# Altium footprint library Package_DFN_QFN.PcbLib: 735 footprints (part 26 of 46)
Each footprint in its own frame and in the unit in brackets; x right, y up, seen from the top. Pads: shape width x height; smd on the part's side, far side on the other; paste and mask are expansions set on the pad; w line width, h text height; cw(c..) or ccw(c..) is an arc to the next point about the centre after c.
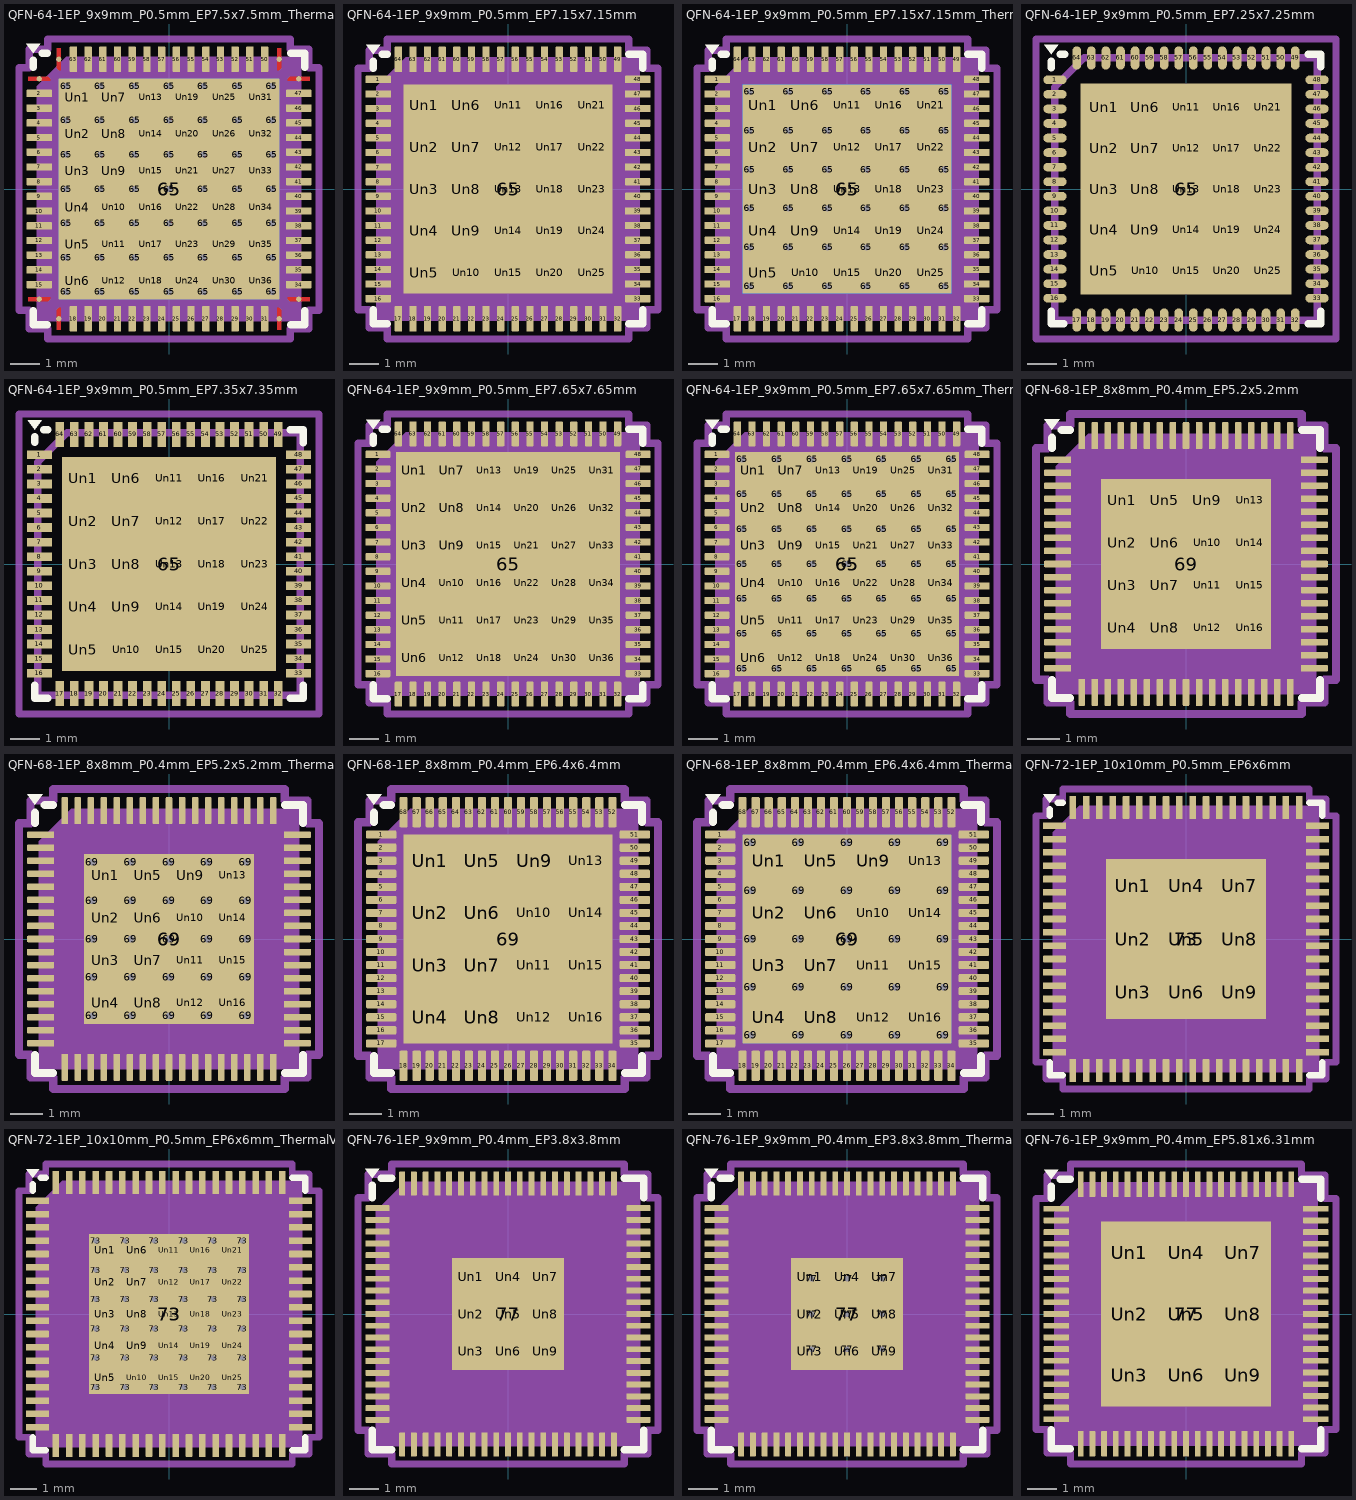
[diagram p25: the footprints below, top view; thin cyan lines are the x and y axes]

## QFN-64-1EP_9x9mm_P0.5mm_EP7.5x7.5mm_ThermalVias [mm] "QFN-64-1EP_9x9mm_P0.5mm_EP7.5x7.5mm_ThermalVias"
pads (151):
  round 0.179 smd: 1(-4.413,3.75) 16(-4.413,-3.75) 17(-3.75,-4.413) 32(3.75,-4.413) 33(4.413,-3.75) 48(4.413,3.75) 49(3.75,4.413) 64(-3.75,4.413)
  rrect25% 0.875x0.25 smd: 2(-4.413,3.25) 3(-4.413,2.75) 4(-4.413,2.25) 5(-4.413,1.75) 6(-4.413,1.25) 7(-4.413,0.75) 8(-4.413,0.25) 9(-4.413,-0.25) 10(-4.413,-0.75) 11(-4.413,-1.25) 12(-4.413,-1.75) 13(-4.413,-2.25) 14(-4.413,-2.75) 15(-4.413,-3.25) 34(4.413,-3.25) 35(4.413,-2.75) 36(4.413,-2.25) 37(4.413,-1.75) 38(4.413,-1.25) 39(4.413,-0.75) 40(4.413,-0.25) 41(4.413,0.25) 42(4.413,0.75) 43(4.413,1.25) 44(4.413,1.75) 45(4.413,2.25) 46(4.413,2.75) 47(4.413,3.25)
  rrect25% 0.25x0.875 smd: 18(-3.25,-4.413) 19(-2.75,-4.413) 20(-2.25,-4.413) 21(-1.75,-4.413) 22(-1.25,-4.413) 23(-0.75,-4.413) 24(-0.25,-4.413) 25(0.25,-4.413) 26(0.75,-4.413) 27(1.25,-4.413) 28(1.75,-4.413) 29(2.25,-4.413) 30(2.75,-4.413) 31(3.25,-4.413) 50(3.25,4.413) 51(2.75,4.413) 52(2.25,4.413) 53(1.75,4.413) 54(1.25,4.413) 55(0.75,4.413) 56(0.25,4.413) 57(-0.25,4.413) 58(-0.75,4.413) 59(-1.25,4.413) 60(-1.75,4.413) 61(-2.25,4.413) 62(-2.75,4.413) 63(-3.25,4.413)
  round 0.5 hole 0.2: 65(-3.5,-3.5) 65(-3.5,-2.333) 65(-3.5,-1.167) 65(-3.5,0) 65(-3.5,1.167) 65(-3.5,2.333) 65(-3.5,3.5) 65(-2.333,-3.5) 65(-2.333,-2.333) 65(-2.333,-1.167) 65(-2.333,0) 65(-2.333,1.167) 65(-2.333,2.333) 65(-2.333,3.5) 65(-1.167,-3.5) 65(-1.167,-2.333) 65(-1.167,-1.167) 65(-1.167,0) 65(-1.167,1.167) 65(-1.167,2.333) 65(-1.167,3.5) 65(0,-3.5) 65(0,-2.333) 65(0,-1.167) 65(0,0) 65(0,1.167) 65(0,2.333) 65(0,3.5) 65(1.167,-3.5) 65(1.167,-2.333) 65(1.167,-1.167) 65(1.167,0) 65(1.167,1.167) 65(1.167,2.333) 65(1.167,3.5) 65(2.333,-3.5) 65(2.333,-2.333) 65(2.333,-1.167) 65(2.333,0) 65(2.333,1.167) 65(2.333,2.333) 65(2.333,3.5) 65(3.5,-3.5) 65(3.5,-2.333) 65(3.5,-1.167) 65(3.5,0) 65(3.5,1.167) 65(3.5,2.333) 65(3.5,3.5)
  rect 7.5x7.5 smd: 65(0,0)
  rect 7.5x7.5 smd far side: 65(0,0)
  rrect25% 1.01x1.01 on Top Paste: Un1(-3.125,3.125) Un2(-3.125,1.875) Un3(-3.125,0.625) Un4(-3.125,-0.625) Un5(-3.125,-1.875) Un6(-3.125,-3.125) Un7(-1.875,3.125) Un8(-1.875,1.875) Un9(-1.875,0.625) Un10(-1.875,-0.625) Un11(-1.875,-1.875) Un12(-1.875,-3.125) Un13(-0.625,3.125) Un14(-0.625,1.875) Un15(-0.625,0.625) Un16(-0.625,-0.625) Un17(-0.625,-1.875) Un18(-0.625,-3.125) Un19(0.625,3.125) Un20(0.625,1.875) Un21(0.625,0.625) Un22(0.625,-0.625) Un23(0.625,-1.875) Un24(0.625,-3.125) Un25(1.875,3.125) Un26(1.875,1.875) Un27(1.875,0.625) Un28(1.875,-0.625) Un29(1.875,-1.875) Un30(1.875,-3.125) Un31(3.125,3.125) Un32(3.125,1.875) Un33(3.125,0.625) Un34(3.125,-0.625) Un35(3.125,-1.875) Un36(3.125,-3.125)
F.Cu:
  region: -4.038,3.749 -4.038,3.688 -4.788,3.688 -4.788,3.812 -4.101,3.812
  region: -4.038,-3.749 -4.101,-3.812 -4.788,-3.812 -4.788,-3.688 -4.038,-3.688
  region: -3.688,-4.788 -3.812,-4.788 -3.812,-4.101 -3.749,-4.038 -3.688,-4.038
  region: 3.812,-4.101 3.812,-4.788 3.688,-4.788 3.688,-4.038 3.749,-4.038
  region: 4.788,-3.812 4.101,-3.812 4.038,-3.749 4.038,-3.688 4.788,-3.688
  region: 4.788,3.688 4.038,3.688 4.038,3.749 4.101,3.812 4.788,3.812
  region: 3.812,4.101 3.749,4.038 3.688,4.038 3.688,4.788 3.812,4.788
  region: -3.688,4.038 -3.749,4.038 -3.812,4.101 -3.812,4.788 -3.688,4.788
F.SilkS:
  region: -4.61,4.61 -4.85,4.94 -4.37,4.94
  lines w0.254: -4.61,-4.135 -4.61,-4.61 -4.135,-4.61 ; -4.61,4.135 -4.61,4.37 ; -4.31,4.61 -4.135,4.61 ; 4.135,-4.61 4.61,-4.61 4.61,-4.135 ; 4.135,4.61 4.61,4.61 4.61,4.135
F.Paste:
  region: -4.038,3.749 -4.038,3.688 -4.788,3.688 -4.788,3.812 -4.101,3.812
  region: -4.038,-3.749 -4.101,-3.812 -4.788,-3.812 -4.788,-3.688 -4.038,-3.688
  region: -3.688,-4.788 -3.812,-4.788 -3.812,-4.101 -3.749,-4.038 -3.688,-4.038
  region: 3.812,-4.101 3.812,-4.788 3.688,-4.788 3.688,-4.038 3.749,-4.038
  region: 4.788,-3.812 4.101,-3.812 4.038,-3.749 4.038,-3.688 4.788,-3.688
  region: 4.788,3.688 4.038,3.688 4.038,3.749 4.101,3.812 4.788,3.812
  region: 3.812,4.101 3.749,4.038 3.688,4.038 3.688,4.788 3.812,4.788
  region: -3.688,4.038 -3.749,4.038 -3.812,4.101 -3.812,4.788 -3.688,4.788
F.Mask:
  region: -4.038,3.749 -4.038,3.688 -4.788,3.688 -4.788,3.812 -4.101,3.812
  region: -4.038,-3.749 -4.101,-3.812 -4.788,-3.812 -4.788,-3.688 -4.038,-3.688
  region: -3.688,-4.788 -3.812,-4.788 -3.812,-4.101 -3.749,-4.038 -3.688,-4.038
  region: 3.812,-4.101 3.812,-4.788 3.688,-4.788 3.688,-4.038 3.749,-4.038
  region: 4.788,-3.812 4.101,-3.812 4.038,-3.749 4.038,-3.688 4.788,-3.688
  region: 4.788,3.688 4.038,3.688 4.038,3.749 4.101,3.812 4.788,3.812
  region: 3.812,4.101 3.749,4.038 3.688,4.038 3.688,4.788 3.812,4.788
  region: -3.688,4.038 -3.749,4.038 -3.812,4.101 -3.812,4.788 -3.688,4.788
Top Component Center:
  lines w0.127: -0.127,0 0.127,0 -0.127,0 ; 0,-0.127 0,0.127 0,-0.127
Top Assembly:
  region: 4.5,-4.5 -4.5,-4.5 -4.5,3.5 -3.5,4.5 4.5,4.5
Top Courtyard:
  lines w0.254: -5.1,-4.13 -5.1,4.13 -4.75,4.13 -4.75,4.75 -4.13,4.75 -4.13,5.1 4.13,5.1 4.13,4.75 4.75,4.75 4.75,4.13 5.1,4.13 5.1,-4.13 4.75,-4.13 4.75,-4.75 4.13,-4.75 4.13,-5.1 -4.13,-5.1 -4.13,-4.75 -4.75,-4.75 -4.75,-4.13 -5.1,-4.13
Top Designator:
  text ".Designator" at -3.43,-0.344 h1.52
3D body "QFN-64-1EP_9x9mm_P0.5mm_EP7.35x7.35mm.step": height 0.75, standoff 0, extent -4.5,-4.5 4.5,4.5
3D body "QFN-64-1EP_9x9mm_P0.5mm_EP7.35x7.35mm.step": height 0.75, standoff 0, extent -4.5,-4.5 4.5,4.5
3D body "QFN-64-1EP_9x9mm_P0.5mm_EP7.35x7.35mm.step": height 0.75, standoff 0, extent -4.5,-4.5 4.5,4.5
3D body "QFN-64-1EP_9x9mm_P0.5mm_EP7.35x7.35mm.step": height 0.75, standoff 0, extent -4.5,-4.5 4.5,4.5

## QFN-64-1EP_9x9mm_P0.5mm_EP7.15x7.15mm [mm] "QFN-64-1EP_9x9mm_P0.5mm_EP7.15x7.15mm"
pads (90):
  rrect25% 0.875x0.25 smd: 1(-4.437,3.75) 2(-4.437,3.25) 3(-4.437,2.75) 4(-4.437,2.25) 5(-4.437,1.75) 6(-4.437,1.25) 7(-4.437,0.75) 8(-4.437,0.25) 9(-4.437,-0.25) 10(-4.437,-0.75) 11(-4.437,-1.25) 12(-4.437,-1.75) 13(-4.437,-2.25) 14(-4.437,-2.75) 15(-4.437,-3.25) 16(-4.437,-3.75) 33(4.437,-3.75) 34(4.437,-3.25) 35(4.437,-2.75) 36(4.437,-2.25) 37(4.437,-1.75) 38(4.437,-1.25) 39(4.437,-0.75) 40(4.437,-0.25) 41(4.437,0.25) 42(4.437,0.75) 43(4.437,1.25) 44(4.437,1.75) 45(4.437,2.25) 46(4.437,2.75) 47(4.437,3.25) 48(4.437,3.75)
  rrect25% 0.25x0.875 smd: 17(-3.75,-4.437) 18(-3.25,-4.437) 19(-2.75,-4.437) 20(-2.25,-4.437) 21(-1.75,-4.437) 22(-1.25,-4.437) 23(-0.75,-4.437) 24(-0.25,-4.437) 25(0.25,-4.437) 26(0.75,-4.437) 27(1.25,-4.437) 28(1.75,-4.437) 29(2.25,-4.437) 30(2.75,-4.437) 31(3.25,-4.437) 32(3.75,-4.437) 49(3.75,4.437) 50(3.25,4.437) 51(2.75,4.437) 52(2.25,4.437) 53(1.75,4.437) 54(1.25,4.437) 55(0.75,4.437) 56(0.25,4.437) 57(-0.25,4.437) 58(-0.75,4.437) 59(-1.25,4.437) 60(-1.75,4.437) 61(-2.25,4.437) 62(-2.75,4.437) 63(-3.25,4.437) 64(-3.75,4.437)
  rect 7.15x7.15 smd: 65(0,0)
  rrect22% 1.15x1.15 on Top Paste: Un1(-2.86,2.86) Un2(-2.86,1.43) Un3(-2.86,0) Un4(-2.86,-1.43) Un5(-2.86,-2.86) Un6(-1.43,2.86) Un7(-1.43,1.43) Un8(-1.43,0) Un9(-1.43,-1.43) Un10(-1.43,-2.86) Un11(0,2.86) Un12(0,1.43) Un13(0,0) Un14(0,-1.43) Un15(0,-2.86) Un16(1.43,2.86) Un17(1.43,1.43) Un18(1.43,0) Un19(1.43,-1.43) Un20(1.43,-2.86) Un21(2.86,2.86) Un22(2.86,1.43) Un23(2.86,0) Un24(2.86,-1.43) Un25(2.86,-2.86)
F.SilkS:
  region: -4.61,4.61 -4.85,4.94 -4.37,4.94
  lines w0.254: -4.61,-4.135 -4.61,-4.61 -4.135,-4.61 ; -4.61,4.135 -4.61,4.37 ; -4.31,4.61 -4.135,4.61 ; 4.135,-4.61 4.61,-4.61 4.61,-4.135 ; 4.135,4.61 4.61,4.61 4.61,4.135
Top Component Center:
  lines w0.127: -0.127,0 0.127,0 -0.127,0 ; 0,-0.127 0,0.127 0,-0.127
Top Assembly:
  region: 4.5,-4.5 -4.5,-4.5 -4.5,3.5 -3.5,4.5 4.5,4.5
Top Courtyard:
  lines w0.254: -5.13,-4.13 -4.75,-4.13 -4.75,-4.75 -4.13,-4.75 -4.13,-5.13 4.13,-5.13 4.13,-4.75 4.75,-4.75 4.75,-4.13 5.13,-4.13 5.13,4.13 4.75,4.13 4.75,4.75 4.13,4.75 4.13,5.13 -4.13,5.13 -4.13,4.75 -4.75,4.75 -4.75,4.13 -5.13,4.13 -5.13,-4.13
Top Designator:
  text ".Designator" at -3.43,-0.344 h1.52
3D body "QFN-64-1EP_9x9mm_P0.5mm_EP7.35x7.35mm.step": height 0.75, standoff 0, extent -4.5,-4.5 4.5,4.5

## QFN-64-1EP_9x9mm_P0.5mm_EP7.15x7.15mm_ThermalVias [mm] "QFN-64-1EP_9x9mm_P0.5mm_EP7.15x7.15mm_ThermalVias"
pads (127):
  rrect25% 0.875x0.25 smd: 1(-4.437,3.75) 2(-4.437,3.25) 3(-4.437,2.75) 4(-4.437,2.25) 5(-4.437,1.75) 6(-4.437,1.25) 7(-4.437,0.75) 8(-4.437,0.25) 9(-4.437,-0.25) 10(-4.437,-0.75) 11(-4.437,-1.25) 12(-4.437,-1.75) 13(-4.437,-2.25) 14(-4.437,-2.75) 15(-4.437,-3.25) 16(-4.437,-3.75) 33(4.437,-3.75) 34(4.437,-3.25) 35(4.437,-2.75) 36(4.437,-2.25) 37(4.437,-1.75) 38(4.437,-1.25) 39(4.437,-0.75) 40(4.437,-0.25) 41(4.437,0.25) 42(4.437,0.75) 43(4.437,1.25) 44(4.437,1.75) 45(4.437,2.25) 46(4.437,2.75) 47(4.437,3.25) 48(4.437,3.75)
  rrect25% 0.25x0.875 smd: 17(-3.75,-4.437) 18(-3.25,-4.437) 19(-2.75,-4.437) 20(-2.25,-4.437) 21(-1.75,-4.437) 22(-1.25,-4.437) 23(-0.75,-4.437) 24(-0.25,-4.437) 25(0.25,-4.437) 26(0.75,-4.437) 27(1.25,-4.437) 28(1.75,-4.437) 29(2.25,-4.437) 30(2.75,-4.437) 31(3.25,-4.437) 32(3.75,-4.437) 49(3.75,4.437) 50(3.25,4.437) 51(2.75,4.437) 52(2.25,4.437) 53(1.75,4.437) 54(1.25,4.437) 55(0.75,4.437) 56(0.25,4.437) 57(-0.25,4.437) 58(-0.75,4.437) 59(-1.25,4.437) 60(-1.75,4.437) 61(-2.25,4.437) 62(-2.75,4.437) 63(-3.25,4.437) 64(-3.75,4.437)
  round 0.5 hole 0.2: 65(-3.325,-3.325) 65(-3.325,-1.995) 65(-3.325,-0.665) 65(-3.325,0.665) 65(-3.325,1.995) 65(-3.325,3.325) 65(-1.995,-3.325) 65(-1.995,-1.995) 65(-1.995,-0.665) 65(-1.995,0.665) 65(-1.995,1.995) 65(-1.995,3.325) 65(-0.665,-3.325) 65(-0.665,-1.995) 65(-0.665,-0.665) 65(-0.665,0.665) 65(-0.665,1.995) 65(-0.665,3.325) 65(0.665,-3.325) 65(0.665,-1.995) 65(0.665,-0.665) 65(0.665,0.665) 65(0.665,1.995) 65(0.665,3.325) 65(1.995,-3.325) 65(1.995,-1.995) 65(1.995,-0.665) 65(1.995,0.665) 65(1.995,1.995) 65(1.995,3.325) 65(3.325,-3.325) 65(3.325,-1.995) 65(3.325,-0.665) 65(3.325,0.665) 65(3.325,1.995) 65(3.325,3.325)
  rect 7.15x7.15 smd: 65(0,0)
  rect 7.15x7.15 smd far side: 65(0,0)
  rrect22% 1.15x1.15 on Top Paste: Un1(-2.86,2.86) Un2(-2.86,1.43) Un3(-2.86,0) Un4(-2.86,-1.43) Un5(-2.86,-2.86) Un6(-1.43,2.86) Un7(-1.43,1.43) Un8(-1.43,0) Un9(-1.43,-1.43) Un10(-1.43,-2.86) Un11(0,2.86) Un12(0,1.43) Un13(0,0) Un14(0,-1.43) Un15(0,-2.86) Un16(1.43,2.86) Un17(1.43,1.43) Un18(1.43,0) Un19(1.43,-1.43) Un20(1.43,-2.86) Un21(2.86,2.86) Un22(2.86,1.43) Un23(2.86,0) Un24(2.86,-1.43) Un25(2.86,-2.86)
F.SilkS:
  region: -4.61,4.61 -4.85,4.94 -4.37,4.94
  lines w0.254: -4.61,-4.135 -4.61,-4.61 -4.135,-4.61 ; -4.61,4.135 -4.61,4.37 ; -4.31,4.61 -4.135,4.61 ; 4.135,-4.61 4.61,-4.61 4.61,-4.135 ; 4.135,4.61 4.61,4.61 4.61,4.135
Top Component Center:
  lines w0.127: -0.127,0 0.127,0 -0.127,0 ; 0,-0.127 0,0.127 0,-0.127
Top Assembly:
  region: 4.5,-4.5 -4.5,-4.5 -4.5,3.5 -3.5,4.5 4.5,4.5
Top Courtyard:
  lines w0.254: -5.13,-4.13 -5.13,4.13 -4.75,4.13 -4.75,4.75 -4.13,4.75 -4.13,5.13 4.13,5.13 4.13,4.75 4.75,4.75 4.75,4.13 5.13,4.13 5.13,-4.13 4.75,-4.13 4.75,-4.75 4.13,-4.75 4.13,-5.13 -4.13,-5.13 -4.13,-4.75 -4.75,-4.75 -4.75,-4.13 -5.13,-4.13
Top Designator:
  text ".Designator" at -3.43,-0.344 h1.52
3D body "QFN-64-1EP_9x9mm_P0.5mm_EP7.35x7.35mm.step": height 0.75, standoff 0, extent -4.5,-4.5 4.5,4.5

## QFN-64-1EP_9x9mm_P0.5mm_EP7.25x7.25mm [mm] "QFN-64-1EP_9x9mm_P0.5mm_EP7.25x7.25mm"
pads (90):
  rrect100% 0.8x0.3 smd: 1(-4.5,3.75) 2(-4.5,3.25) 3(-4.5,2.75) 4(-4.5,2.25) 5(-4.5,1.75) 6(-4.5,1.25) 7(-4.5,0.75) 8(-4.5,0.25) 9(-4.5,-0.25) 10(-4.5,-0.75) 11(-4.5,-1.25) 12(-4.5,-1.75) 13(-4.5,-2.25) 14(-4.5,-2.75) 15(-4.5,-3.25) 16(-4.5,-3.75) 33(4.5,-3.75) 34(4.5,-3.25) 35(4.5,-2.75) 36(4.5,-2.25) 37(4.5,-1.75) 38(4.5,-1.25) 39(4.5,-0.75) 40(4.5,-0.25) 41(4.5,0.25) 42(4.5,0.75) 43(4.5,1.25) 44(4.5,1.75) 45(4.5,2.25) 46(4.5,2.75) 47(4.5,3.25) 48(4.5,3.75)
  rrect100% 0.3x0.8 smd: 17(-3.75,-4.5) 18(-3.25,-4.5) 19(-2.75,-4.5) 20(-2.25,-4.5) 21(-1.75,-4.5) 22(-1.25,-4.5) 23(-0.75,-4.5) 24(-0.25,-4.5) 25(0.25,-4.5) 26(0.75,-4.5) 27(1.25,-4.5) 28(1.75,-4.5) 29(2.25,-4.5) 30(2.75,-4.5) 31(3.25,-4.5) 32(3.75,-4.5) 49(3.75,4.5) 50(3.25,4.5) 51(2.75,4.5) 52(2.25,4.5) 53(1.75,4.5) 54(1.25,4.5) 55(0.75,4.5) 56(0.25,4.5) 57(-0.25,4.5) 58(-0.75,4.5) 59(-1.25,4.5) 60(-1.75,4.5) 61(-2.25,4.5) 62(-2.75,4.5) 63(-3.25,4.5) 64(-3.75,4.5)
  rect 7.25x7.25 smd: 65(0,0)
  rect 1.19x1.19 on Top Paste: Un1(-2.8,2.8) Un2(-2.8,1.4) Un3(-2.8,0) Un4(-2.8,-1.4) Un5(-2.8,-2.8) Un6(-1.4,2.8) Un7(-1.4,1.4) Un8(-1.4,0) Un9(-1.4,-1.4) Un10(-1.4,-2.8) Un11(0,2.8) Un12(0,1.4) Un13(0,0) Un14(0,-1.4) Un15(0,-2.8) Un16(1.4,2.8) Un17(1.4,1.4) Un18(1.4,0) Un19(1.4,-1.4) Un20(1.4,-2.8) Un21(2.8,2.8) Un22(2.8,1.4) Un23(2.8,0) Un24(2.8,-1.4) Un25(2.8,-2.8)
F.SilkS:
  region: -4.62,4.62 -4.86,4.95 -4.38,4.95
  lines w0.254: -4.62,-4.2 -4.62,-4.62 -4.2,-4.62 ; -4.62,4.16 -4.62,4.38 ; -4.32,4.62 -4.16,4.62 ; 4.2,-4.62 4.62,-4.62 4.62,-4.2 ; 4.2,4.62 4.62,4.62 4.62,4.2
Top Component Center:
  lines w0.127: -0.127,0 0.127,0 -0.127,0 ; 0,-0.127 0,0.127 0,-0.127
Top Assembly:
  lines w0.254: -4.5,-4.5 -4.5,3.5 -3.5,4.5 4.5,4.5 4.5,-4.5 -4.5,-4.5
Top Courtyard:
  lines w0.254: -5.15,-5.15 -5.15,5.15 5.15,5.15 5.15,-5.15 -5.15,-5.15
Top Designator:
  text ".Designator" at -3.43,-0.344 h1.52
3D body "QFN-64-1EP_9x9mm_P0.5mm_EP7.35x7.35mm.step": height 0.75, standoff 0, extent -4.5,-4.5 4.5,4.5

## QFN-64-1EP_9x9mm_P0.5mm_EP7.35x7.35mm [mm] "QFN-64-1EP_9x9mm_P0.5mm_EP7.35x7.35mm"
pads (90):
  rect 0.85x0.3 smd: 1(-4.45,3.75) 2(-4.45,3.25) 3(-4.45,2.75) 4(-4.45,2.25) 5(-4.45,1.75) 6(-4.45,1.25) 7(-4.45,0.75) 8(-4.45,0.25) 9(-4.45,-0.25) 10(-4.45,-0.75) 11(-4.45,-1.25) 12(-4.45,-1.75) 13(-4.45,-2.25) 14(-4.45,-2.75) 15(-4.45,-3.25) 16(-4.45,-3.75) 33(4.45,-3.75) 34(4.45,-3.25) 35(4.45,-2.75) 36(4.45,-2.25) 37(4.45,-1.75) 38(4.45,-1.25) 39(4.45,-0.75) 40(4.45,-0.25) 41(4.45,0.25) 42(4.45,0.75) 43(4.45,1.25) 44(4.45,1.75) 45(4.45,2.25) 46(4.45,2.75) 47(4.45,3.25) 48(4.45,3.75)
  rect 0.3x0.85 smd: 17(-3.75,-4.45) 18(-3.25,-4.45) 19(-2.75,-4.45) 20(-2.25,-4.45) 21(-1.75,-4.45) 22(-1.25,-4.45) 23(-0.75,-4.45) 24(-0.25,-4.45) 25(0.25,-4.45) 26(0.75,-4.45) 27(1.25,-4.45) 28(1.75,-4.45) 29(2.25,-4.45) 30(2.75,-4.45) 31(3.25,-4.45) 32(3.75,-4.45) 49(3.75,4.45) 50(3.25,4.45) 51(2.75,4.45) 52(2.25,4.45) 53(1.75,4.45) 54(1.25,4.45) 55(0.75,4.45) 56(0.25,4.45) 57(-0.25,4.45) 58(-0.75,4.45) 59(-1.25,4.45) 60(-1.75,4.45) 61(-2.25,4.45) 62(-2.75,4.45) 63(-3.25,4.45) 64(-3.75,4.45)
  rect 7.35x7.35 smd: 65(0,0)
  rect 1.19x1.19 on Top Paste: Un1(-2.94,2.94) Un2(-2.94,1.47) Un3(-2.94,0) Un4(-2.94,-1.47) Un5(-2.94,-2.94) Un6(-1.47,2.94) Un7(-1.47,1.47) Un8(-1.47,0) Un9(-1.47,-1.47) Un10(-1.47,-2.94) Un11(0,2.94) Un12(0,1.47) Un13(0,0) Un14(0,-1.47) Un15(0,-2.94) Un16(1.47,2.94) Un17(1.47,1.47) Un18(1.47,0) Un19(1.47,-1.47) Un20(1.47,-2.94) Un21(2.94,2.94) Un22(2.94,1.47) Un23(2.94,0) Un24(2.94,-1.47) Un25(2.94,-2.94)
F.SilkS:
  region: -4.61,4.61 -4.85,4.94 -4.37,4.94
  lines w0.254: -4.61,4.17 -4.61,4.37 ; -4.607,-4.16 -4.607,-4.61 -4.16,-4.61 ; -4.31,4.61 -4.16,4.61 ; 4.16,-4.61 4.61,-4.61 4.61,-4.16 ; 4.16,4.61 4.61,4.61 4.61,4.16
Top Component Center:
  lines w0.127: -0.127,0 0.127,0 -0.127,0 ; 0,-0.127 0,0.127 0,-0.127
Top Assembly:
  lines w0.254: -4.5,-4.5 -4.5,3.5 -3.5,4.5 4.5,4.5 4.5,-4.5 -4.5,-4.5
Top Courtyard:
  lines w0.254: -5.15,-5.15 -5.15,5.15 5.15,5.15 5.15,-5.15 -5.15,-5.15
Top Designator:
  text ".Designator" at -3.43,-0.344 h1.52
3D body "QFN-64-1EP_9x9mm_P0.5mm_EP7.35x7.35mm.step": height 0.75, standoff 0, extent -4.5,-4.5 4.5,4.5

## QFN-64-1EP_9x9mm_P0.5mm_EP7.65x7.65mm [mm] "QFN-64-1EP_9x9mm_P0.5mm_EP7.65x7.65mm"
pads (101):
  rrect25% 0.85x0.25 smd: 1(-4.45,3.75) 2(-4.45,3.25) 3(-4.45,2.75) 4(-4.45,2.25) 5(-4.45,1.75) 6(-4.45,1.25) 7(-4.45,0.75) 8(-4.45,0.25) 9(-4.45,-0.25) 10(-4.45,-0.75) 11(-4.45,-1.25) 12(-4.45,-1.75) 13(-4.45,-2.25) 14(-4.45,-2.75) 15(-4.45,-3.25) 16(-4.45,-3.75) 33(4.45,-3.75) 34(4.45,-3.25) 35(4.45,-2.75) 36(4.45,-2.25) 37(4.45,-1.75) 38(4.45,-1.25) 39(4.45,-0.75) 40(4.45,-0.25) 41(4.45,0.25) 42(4.45,0.75) 43(4.45,1.25) 44(4.45,1.75) 45(4.45,2.25) 46(4.45,2.75) 47(4.45,3.25) 48(4.45,3.75)
  rrect25% 0.25x0.85 smd: 17(-3.75,-4.45) 18(-3.25,-4.45) 19(-2.75,-4.45) 20(-2.25,-4.45) 21(-1.75,-4.45) 22(-1.25,-4.45) 23(-0.75,-4.45) 24(-0.25,-4.45) 25(0.25,-4.45) 26(0.75,-4.45) 27(1.25,-4.45) 28(1.75,-4.45) 29(2.25,-4.45) 30(2.75,-4.45) 31(3.25,-4.45) 32(3.75,-4.45) 49(3.75,4.45) 50(3.25,4.45) 51(2.75,4.45) 52(2.25,4.45) 53(1.75,4.45) 54(1.25,4.45) 55(0.75,4.45) 56(0.25,4.45) 57(-0.25,4.45) 58(-0.75,4.45) 59(-1.25,4.45) 60(-1.75,4.45) 61(-2.25,4.45) 62(-2.75,4.45) 63(-3.25,4.45) 64(-3.75,4.45)
  rect 7.65x7.65 smd: 65(0,0)
  rrect24% 1.03x1.03 on Top Paste: Un1(-3.2,3.2) Un2(-3.2,1.92) Un3(-3.2,0.64) Un4(-3.2,-0.64) Un5(-3.2,-1.92) Un6(-3.2,-3.2) Un7(-1.92,3.2) Un8(-1.92,1.92) Un9(-1.92,0.64) Un10(-1.92,-0.64) Un11(-1.92,-1.92) Un12(-1.92,-3.2) Un13(-0.64,3.2) Un14(-0.64,1.92) Un15(-0.64,0.64) Un16(-0.64,-0.64) Un17(-0.64,-1.92) Un18(-0.64,-3.2) Un19(0.64,3.2) Un20(0.64,1.92) Un21(0.64,0.64) Un22(0.64,-0.64) Un23(0.64,-1.92) Un24(0.64,-3.2) Un25(1.92,3.2) Un26(1.92,1.92) Un27(1.92,0.64) Un28(1.92,-0.64) Un29(1.92,-1.92) Un30(1.92,-3.2) Un31(3.2,3.2) Un32(3.2,1.92) Un33(3.2,0.64) Un34(3.2,-0.64) Un35(3.2,-1.92) Un36(3.2,-3.2)
F.SilkS:
  region: -4.61,4.61 -4.85,4.94 -4.37,4.94
  lines w0.254: -4.61,-4.135 -4.61,-4.61 -4.135,-4.61 ; -4.61,4.135 -4.61,4.37 ; -4.31,4.61 -4.135,4.61 ; 4.135,-4.61 4.61,-4.61 4.61,-4.135 ; 4.135,4.61 4.61,4.61 4.61,4.135
Top Component Center:
  lines w0.127: -0.127,0 0.127,0 -0.127,0 ; 0,-0.127 0,0.127 0,-0.127
Top Assembly:
  region: 4.5,-4.5 -4.5,-4.5 -4.5,3.5 -3.5,4.5 4.5,4.5
Top Courtyard:
  lines w0.254: -5.13,-4.13 -4.75,-4.13 -4.75,-4.75 -4.13,-4.75 -4.13,-5.13 4.13,-5.13 4.13,-4.75 4.75,-4.75 4.75,-4.13 5.13,-4.13 5.13,4.13 4.75,4.13 4.75,4.75 4.13,4.75 4.13,5.13 -4.13,5.13 -4.13,4.75 -4.75,4.75 -4.75,4.13 -5.13,4.13 -5.13,-4.13
Top Designator:
  text ".Designator" at -3.43,-0.344 h1.52
3D body "QFN-64-1EP_9x9mm_P0.5mm_EP7.35x7.35mm.step": height 0.75, standoff 0, extent -4.5,-4.5 4.5,4.5

## QFN-64-1EP_9x9mm_P0.5mm_EP7.65x7.65mm_ThermalVias [mm] "QFN-64-1EP_9x9mm_P0.5mm_EP7.65x7.65mm_ThermalVias"
pads (151):
  rrect25% 0.85x0.25 smd: 1(-4.45,3.75) 2(-4.45,3.25) 3(-4.45,2.75) 4(-4.45,2.25) 5(-4.45,1.75) 6(-4.45,1.25) 7(-4.45,0.75) 8(-4.45,0.25) 9(-4.45,-0.25) 10(-4.45,-0.75) 11(-4.45,-1.25) 12(-4.45,-1.75) 13(-4.45,-2.25) 14(-4.45,-2.75) 15(-4.45,-3.25) 16(-4.45,-3.75) 33(4.45,-3.75) 34(4.45,-3.25) 35(4.45,-2.75) 36(4.45,-2.25) 37(4.45,-1.75) 38(4.45,-1.25) 39(4.45,-0.75) 40(4.45,-0.25) 41(4.45,0.25) 42(4.45,0.75) 43(4.45,1.25) 44(4.45,1.75) 45(4.45,2.25) 46(4.45,2.75) 47(4.45,3.25) 48(4.45,3.75)
  rrect25% 0.25x0.85 smd: 17(-3.75,-4.45) 18(-3.25,-4.45) 19(-2.75,-4.45) 20(-2.25,-4.45) 21(-1.75,-4.45) 22(-1.25,-4.45) 23(-0.75,-4.45) 24(-0.25,-4.45) 25(0.25,-4.45) 26(0.75,-4.45) 27(1.25,-4.45) 28(1.75,-4.45) 29(2.25,-4.45) 30(2.75,-4.45) 31(3.25,-4.45) 32(3.75,-4.45) 49(3.75,4.45) 50(3.25,4.45) 51(2.75,4.45) 52(2.25,4.45) 53(1.75,4.45) 54(1.25,4.45) 55(0.75,4.45) 56(0.25,4.45) 57(-0.25,4.45) 58(-0.75,4.45) 59(-1.25,4.45) 60(-1.75,4.45) 61(-2.25,4.45) 62(-2.75,4.45) 63(-3.25,4.45) 64(-3.75,4.45)
  round 0.5 hole 0.2: 65(-3.575,-3.575) 65(-3.575,-2.383) 65(-3.575,-1.192) 65(-3.575,0) 65(-3.575,1.192) 65(-3.575,2.383) 65(-3.575,3.575) 65(-2.383,-3.575) 65(-2.383,-2.383) 65(-2.383,-1.192) 65(-2.383,0) 65(-2.383,1.192) 65(-2.383,2.383) 65(-2.383,3.575) 65(-1.192,-3.575) 65(-1.192,-2.383) 65(-1.192,-1.192) 65(-1.192,0) 65(-1.192,1.192) 65(-1.192,2.383) 65(-1.192,3.575) 65(0,-3.575) 65(0,-2.383) 65(0,-1.192) 65(0,0) 65(0,1.192) 65(0,2.383) 65(0,3.575) 65(1.192,-3.575) 65(1.192,-2.383) 65(1.192,-1.192) 65(1.192,0) 65(1.192,1.192) 65(1.192,2.383) 65(1.192,3.575) 65(2.383,-3.575) 65(2.383,-2.383) 65(2.383,-1.192) 65(2.383,0) 65(2.383,1.192) 65(2.383,2.383) 65(2.383,3.575) 65(3.575,-3.575) 65(3.575,-2.383) 65(3.575,-1.192) 65(3.575,0) 65(3.575,1.192) 65(3.575,2.383) 65(3.575,3.575)
  rect 7.65x7.65 smd: 65(0,0)
  rect 7.65x7.65 smd far side: 65(0,0)
  rrect24% 1.03x1.03 on Top Paste: Un1(-3.2,3.2) Un2(-3.2,1.92) Un3(-3.2,0.64) Un4(-3.2,-0.64) Un5(-3.2,-1.92) Un6(-3.2,-3.2) Un7(-1.92,3.2) Un8(-1.92,1.92) Un9(-1.92,0.64) Un10(-1.92,-0.64) Un11(-1.92,-1.92) Un12(-1.92,-3.2) Un13(-0.64,3.2) Un14(-0.64,1.92) Un15(-0.64,0.64) Un16(-0.64,-0.64) Un17(-0.64,-1.92) Un18(-0.64,-3.2) Un19(0.64,3.2) Un20(0.64,1.92) Un21(0.64,0.64) Un22(0.64,-0.64) Un23(0.64,-1.92) Un24(0.64,-3.2) Un25(1.92,3.2) Un26(1.92,1.92) Un27(1.92,0.64) Un28(1.92,-0.64) Un29(1.92,-1.92) Un30(1.92,-3.2) Un31(3.2,3.2) Un32(3.2,1.92) Un33(3.2,0.64) Un34(3.2,-0.64) Un35(3.2,-1.92) Un36(3.2,-3.2)
F.SilkS:
  region: -4.61,4.61 -4.85,4.94 -4.37,4.94
  lines w0.254: -4.61,-4.135 -4.61,-4.61 -4.135,-4.61 ; -4.61,4.135 -4.61,4.37 ; -4.31,4.61 -4.135,4.61 ; 4.135,-4.61 4.61,-4.61 4.61,-4.135 ; 4.135,4.61 4.61,4.61 4.61,4.135
Top Component Center:
  lines w0.127: -0.127,0 0.127,0 -0.127,0 ; 0,-0.127 0,0.127 0,-0.127
Top Assembly:
  region: 4.5,-4.5 -4.5,-4.5 -4.5,3.5 -3.5,4.5 4.5,4.5
Top Courtyard:
  lines w0.254: -5.13,-4.13 -4.75,-4.13 -4.75,-4.75 -4.13,-4.75 -4.13,-5.13 4.13,-5.13 4.13,-4.75 4.75,-4.75 4.75,-4.13 5.13,-4.13 5.13,4.13 4.75,4.13 4.75,4.75 4.13,4.75 4.13,5.13 -4.13,5.13 -4.13,4.75 -4.75,4.75 -4.75,4.13 -5.13,4.13 -5.13,-4.13
Top Designator:
  text ".Designator" at -3.43,-0.344 h1.52
3D body "QFN-64-1EP_9x9mm_P0.5mm_EP7.35x7.35mm.step": height 0.75, standoff 0, extent -4.5,-4.5 4.5,4.5

## QFN-68-1EP_8x8mm_P0.4mm_EP5.2x5.2mm [mm] "QFN-68-1EP_8x8mm_P0.4mm_EP5.2x5.2mm"
pads (85):
  rrect25% 0.825x0.2 smd: 1(-3.938,3.2) 2(-3.938,2.8) 3(-3.938,2.4) 4(-3.938,2) 5(-3.938,1.6) 6(-3.938,1.2) 7(-3.938,0.8) 8(-3.938,0.4) 9(-3.938,0) 10(-3.938,-0.4) 11(-3.938,-0.8) 12(-3.938,-1.2) 13(-3.938,-1.6) 14(-3.938,-2) 15(-3.938,-2.4) 16(-3.938,-2.8) 17(-3.938,-3.2) 35(3.938,-3.2) 36(3.938,-2.8) 37(3.938,-2.4) 38(3.938,-2) 39(3.938,-1.6) 40(3.938,-1.2) 41(3.938,-0.8) 42(3.938,-0.4) 43(3.938,0) 44(3.938,0.4) 45(3.938,0.8) 46(3.938,1.2) 47(3.938,1.6) 48(3.938,2) 49(3.938,2.4) 50(3.938,2.8) 51(3.938,3.2)
  rrect25% 0.2x0.825 smd: 18(-3.2,-3.938) 19(-2.8,-3.938) 20(-2.4,-3.938) 21(-2,-3.938) 22(-1.6,-3.938) 23(-1.2,-3.938) 24(-0.8,-3.938) 25(-0.4,-3.938) 26(0,-3.938) 27(0.4,-3.938) 28(0.8,-3.938) 29(1.2,-3.938) 30(1.6,-3.938) 31(2,-3.938) 32(2.4,-3.938) 33(2.8,-3.938) 34(3.2,-3.938) 52(3.2,3.938) 53(2.8,3.938) 54(2.4,3.938) 55(2,3.938) 56(1.6,3.938) 57(1.2,3.938) 58(0.8,3.938) 59(0.4,3.938) 60(0,3.938) 61(-0.4,3.938) 62(-0.8,3.938) 63(-1.2,3.938) 64(-1.6,3.938) 65(-2,3.938) 66(-2.4,3.938) 67(-2.8,3.938) 68(-3.2,3.938)
  rect 5.2x5.2 smd: 69(0,0)
  rrect24% 1.05x1.05 on Top Paste: Un1(-1.95,1.95) Un2(-1.95,0.65) Un3(-1.95,-0.65) Un4(-1.95,-1.95) Un5(-0.65,1.95) Un6(-0.65,0.65) Un7(-0.65,-0.65) Un8(-0.65,-1.95) Un9(0.65,1.95) Un10(0.65,0.65) Un11(0.65,-0.65) Un12(0.65,-1.95) Un13(1.95,1.95) Un14(1.95,0.65) Un15(1.95,-0.65) Un16(1.95,-1.95)
F.SilkS:
  region: -4.11,4.11 -4.35,4.44 -3.87,4.44
  lines w0.254: -4.11,-3.56 -4.11,-4.11 -3.56,-4.11 ; -4.11,3.56 -4.11,3.87 ; -3.81,4.11 -3.56,4.11 ; 3.56,-4.11 4.11,-4.11 4.11,-3.56 ; 3.56,4.11 4.11,4.11 4.11,3.56
Top Component Center:
  lines w0.127: -0.127,0 0.127,0 -0.127,0 ; 0,-0.127 0,0.127 0,-0.127
Top Assembly:
  region: 4,-4 -4,-4 -4,3 -3,4 4,4
Top Courtyard:
  lines w0.254: -4.6,-3.55 -4.6,3.55 -4.25,3.55 -4.25,4.25 -3.55,4.25 -3.55,4.6 3.55,4.6 3.55,4.25 4.25,4.25 4.25,3.55 4.6,3.55 4.6,-3.55 4.25,-3.55 4.25,-4.25 3.55,-4.25 3.55,-4.6 -3.55,-4.6 -3.55,-4.25 -4.25,-4.25 -4.25,-3.55 -4.6,-3.55
Top Designator:
  text ".Designator" at -3.43,-0.344 h1.52
3D body "QFN-68-1EP_8x8mm_P0.4mm_EP5.2x5.2mm.step": height 0.87, standoff 0, extent -4,-4 4,4

## QFN-68-1EP_8x8mm_P0.4mm_EP5.2x5.2mm_ThermalVias [mm] "QFN-68-1EP_8x8mm_P0.4mm_EP5.2x5.2mm_ThermalVias"
pads (111):
  rrect25% 0.825x0.2 smd: 1(-3.938,3.2) 2(-3.938,2.8) 3(-3.938,2.4) 4(-3.938,2) 5(-3.938,1.6) 6(-3.938,1.2) 7(-3.938,0.8) 8(-3.938,0.4) 9(-3.938,0) 10(-3.938,-0.4) 11(-3.938,-0.8) 12(-3.938,-1.2) 13(-3.938,-1.6) 14(-3.938,-2) 15(-3.938,-2.4) 16(-3.938,-2.8) 17(-3.938,-3.2) 35(3.938,-3.2) 36(3.938,-2.8) 37(3.938,-2.4) 38(3.938,-2) 39(3.938,-1.6) 40(3.938,-1.2) 41(3.938,-0.8) 42(3.938,-0.4) 43(3.938,0) 44(3.938,0.4) 45(3.938,0.8) 46(3.938,1.2) 47(3.938,1.6) 48(3.938,2) 49(3.938,2.4) 50(3.938,2.8) 51(3.938,3.2)
  rrect25% 0.2x0.825 smd: 18(-3.2,-3.938) 19(-2.8,-3.938) 20(-2.4,-3.938) 21(-2,-3.938) 22(-1.6,-3.938) 23(-1.2,-3.938) 24(-0.8,-3.938) 25(-0.4,-3.938) 26(0,-3.938) 27(0.4,-3.938) 28(0.8,-3.938) 29(1.2,-3.938) 30(1.6,-3.938) 31(2,-3.938) 32(2.4,-3.938) 33(2.8,-3.938) 34(3.2,-3.938) 52(3.2,3.938) 53(2.8,3.938) 54(2.4,3.938) 55(2,3.938) 56(1.6,3.938) 57(1.2,3.938) 58(0.8,3.938) 59(0.4,3.938) 60(0,3.938) 61(-0.4,3.938) 62(-0.8,3.938) 63(-1.2,3.938) 64(-1.6,3.938) 65(-2,3.938) 66(-2.4,3.938) 67(-2.8,3.938) 68(-3.2,3.938)
  round 0.5 hole 0.2: 69(-2.35,-2.35) 69(-2.35,-1.175) 69(-2.35,0) 69(-2.35,1.175) 69(-2.35,2.35) 69(-1.175,-2.35) 69(-1.175,-1.175) 69(-1.175,0) 69(-1.175,1.175) 69(-1.175,2.35) 69(0,-2.35) 69(0,-1.175) 69(0,0) 69(0,1.175) 69(0,2.35) 69(1.175,-2.35) 69(1.175,-1.175) 69(1.175,0) 69(1.175,1.175) 69(1.175,2.35) 69(2.35,-2.35) 69(2.35,-1.175) 69(2.35,0) 69(2.35,1.175) 69(2.35,2.35)
  rect 5.2x5.2 smd: 69(0,0)
  rect 5.2x5.2 smd far side: 69(0,0)
  rrect25% 1.01x1.01 on Top Paste: Un1(-1.95,1.95) Un2(-1.95,0.65) Un3(-1.95,-0.65) Un4(-1.95,-1.95) Un5(-0.65,1.95) Un6(-0.65,0.65) Un7(-0.65,-0.65) Un8(-0.65,-1.95) Un9(0.65,1.95) Un10(0.65,0.65) Un11(0.65,-0.65) Un12(0.65,-1.95) Un13(1.95,1.95) Un14(1.95,0.65) Un15(1.95,-0.65) Un16(1.95,-1.95)
F.SilkS:
  region: -4.11,4.11 -4.35,4.44 -3.87,4.44
  lines w0.254: -4.11,-3.56 -4.11,-4.11 -3.56,-4.11 ; -4.11,3.56 -4.11,3.87 ; -3.81,4.11 -3.56,4.11 ; 3.56,-4.11 4.11,-4.11 4.11,-3.56 ; 3.56,4.11 4.11,4.11 4.11,3.56
Top Component Center:
  lines w0.127: -0.127,0 0.127,0 -0.127,0 ; 0,-0.127 0,0.127 0,-0.127
Top Assembly:
  region: 4,-4 -4,-4 -4,3 -3,4 4,4
Top Courtyard:
  lines w0.254: -4.6,-3.55 -4.6,3.55 -4.25,3.55 -4.25,4.25 -3.55,4.25 -3.55,4.6 3.55,4.6 3.55,4.25 4.25,4.25 4.25,3.55 4.6,3.55 4.6,-3.55 4.25,-3.55 4.25,-4.25 3.55,-4.25 3.55,-4.6 -3.55,-4.6 -3.55,-4.25 -4.25,-4.25 -4.25,-3.55 -4.6,-3.55
Top Designator:
  text ".Designator" at -3.43,-0.344 h1.52
3D body "QFN-68-1EP_8x8mm_P0.4mm_EP5.2x5.2mm.step": height 0.87, standoff 0, extent -4,-4 4,4

## QFN-68-1EP_8x8mm_P0.4mm_EP6.4x6.4mm [mm] "QFN-68-1EP_8x8mm_P0.4mm_EP6.4x6.4mm"
pads (85):
  rrect25% 0.925x0.25 smd: 1(-3.888,3.2) 2(-3.888,2.8) 3(-3.888,2.4) 4(-3.888,2) 5(-3.888,1.6) 6(-3.888,1.2) 7(-3.888,0.8) 8(-3.888,0.4) 9(-3.888,0) 10(-3.888,-0.4) 11(-3.888,-0.8) 12(-3.888,-1.2) 13(-3.888,-1.6) 14(-3.888,-2) 15(-3.888,-2.4) 16(-3.888,-2.8) 17(-3.888,-3.2) 35(3.888,-3.2) 36(3.888,-2.8) 37(3.888,-2.4) 38(3.888,-2) 39(3.888,-1.6) 40(3.888,-1.2) 41(3.888,-0.8) 42(3.888,-0.4) 43(3.888,0) 44(3.888,0.4) 45(3.888,0.8) 46(3.888,1.2) 47(3.888,1.6) 48(3.888,2) 49(3.888,2.4) 50(3.888,2.8) 51(3.888,3.2)
  rrect25% 0.25x0.925 smd: 18(-3.2,-3.888) 19(-2.8,-3.888) 20(-2.4,-3.888) 21(-2,-3.888) 22(-1.6,-3.888) 23(-1.2,-3.888) 24(-0.8,-3.888) 25(-0.4,-3.888) 26(0,-3.888) 27(0.4,-3.888) 28(0.8,-3.888) 29(1.2,-3.888) 30(1.6,-3.888) 31(2,-3.888) 32(2.4,-3.888) 33(2.8,-3.888) 34(3.2,-3.888) 52(3.2,3.888) 53(2.8,3.888) 54(2.4,3.888) 55(2,3.888) 56(1.6,3.888) 57(1.2,3.888) 58(0.8,3.888) 59(0.4,3.888) 60(0,3.888) 61(-0.4,3.888) 62(-0.8,3.888) 63(-1.2,3.888) 64(-1.6,3.888) 65(-2,3.888) 66(-2.4,3.888) 67(-2.8,3.888) 68(-3.2,3.888)
  rect 6.4x6.4 smd: 69(0,0)
  rrect19% 1.29x1.29 on Top Paste: Un1(-2.4,2.4) Un2(-2.4,0.8) Un3(-2.4,-0.8) Un4(-2.4,-2.4) Un5(-0.8,2.4) Un6(-0.8,0.8) Un7(-0.8,-0.8) Un8(-0.8,-2.4) Un9(0.8,2.4) Un10(0.8,0.8) Un11(0.8,-0.8) Un12(0.8,-2.4) Un13(2.4,2.4) Un14(2.4,0.8) Un15(2.4,-0.8) Un16(2.4,-2.4)
F.SilkS:
  region: -4.11,4.11 -4.35,4.44 -3.87,4.44
  lines w0.254: -4.11,-3.585 -4.11,-4.11 -3.585,-4.11 ; -4.11,3.585 -4.11,3.87 ; -3.81,4.11 -3.585,4.11 ; 3.585,-4.11 4.11,-4.11 4.11,-3.585 ; 3.585,4.11 4.11,4.11 4.11,3.585
Top Component Center:
  lines w0.127: -0.127,0 0.127,0 -0.127,0 ; 0,-0.127 0,0.127 0,-0.127
Top Assembly:
  region: 4,-4 -4,-4 -4,3 -3,4 4,4
Top Courtyard:
  lines w0.254: -4.6,-3.58 -4.25,-3.58 -4.25,-4.25 -3.58,-4.25 -3.58,-4.6 3.58,-4.6 3.58,-4.25 4.25,-4.25 4.25,-3.58 4.6,-3.58 4.6,3.58 4.25,3.58 4.25,4.25 3.58,4.25 3.58,4.6 -3.58,4.6 -3.58,4.25 -4.25,4.25 -4.25,3.58 -4.6,3.58 -4.6,-3.58
Top Designator:
  text ".Designator" at -3.43,-0.344 h1.52
3D body "QFN-68-1EP_8x8mm_P0.4mm_EP5.2x5.2mm.step": height 0.87, standoff 0, extent -4,-4 4,4

## QFN-68-1EP_8x8mm_P0.4mm_EP6.4x6.4mm_ThermalVias [mm] "QFN-68-1EP_8x8mm_P0.4mm_EP6.4x6.4mm_ThermalVias"
pads (111):
  rrect25% 0.925x0.25 smd: 1(-3.888,3.2) 2(-3.888,2.8) 3(-3.888,2.4) 4(-3.888,2) 5(-3.888,1.6) 6(-3.888,1.2) 7(-3.888,0.8) 8(-3.888,0.4) 9(-3.888,0) 10(-3.888,-0.4) 11(-3.888,-0.8) 12(-3.888,-1.2) 13(-3.888,-1.6) 14(-3.888,-2) 15(-3.888,-2.4) 16(-3.888,-2.8) 17(-3.888,-3.2) 35(3.888,-3.2) 36(3.888,-2.8) 37(3.888,-2.4) 38(3.888,-2) 39(3.888,-1.6) 40(3.888,-1.2) 41(3.888,-0.8) 42(3.888,-0.4) 43(3.888,0) 44(3.888,0.4) 45(3.888,0.8) 46(3.888,1.2) 47(3.888,1.6) 48(3.888,2) 49(3.888,2.4) 50(3.888,2.8) 51(3.888,3.2)
  rrect25% 0.25x0.925 smd: 18(-3.2,-3.888) 19(-2.8,-3.888) 20(-2.4,-3.888) 21(-2,-3.888) 22(-1.6,-3.888) 23(-1.2,-3.888) 24(-0.8,-3.888) 25(-0.4,-3.888) 26(0,-3.888) 27(0.4,-3.888) 28(0.8,-3.888) 29(1.2,-3.888) 30(1.6,-3.888) 31(2,-3.888) 32(2.4,-3.888) 33(2.8,-3.888) 34(3.2,-3.888) 52(3.2,3.888) 53(2.8,3.888) 54(2.4,3.888) 55(2,3.888) 56(1.6,3.888) 57(1.2,3.888) 58(0.8,3.888) 59(0.4,3.888) 60(0,3.888) 61(-0.4,3.888) 62(-0.8,3.888) 63(-1.2,3.888) 64(-1.6,3.888) 65(-2,3.888) 66(-2.4,3.888) 67(-2.8,3.888) 68(-3.2,3.888)
  round 0.5 hole 0.2: 69(-2.95,-2.95) 69(-2.95,-1.475) 69(-2.95,0) 69(-2.95,1.475) 69(-2.95,2.95) 69(-1.475,-2.95) 69(-1.475,-1.475) 69(-1.475,0) 69(-1.475,1.475) 69(-1.475,2.95) 69(0,-2.95) 69(0,-1.475) 69(0,0) 69(0,1.475) 69(0,2.95) 69(1.475,-2.95) 69(1.475,-1.475) 69(1.475,0) 69(1.475,1.475) 69(1.475,2.95) 69(2.95,-2.95) 69(2.95,-1.475) 69(2.95,0) 69(2.95,1.475) 69(2.95,2.95)
  rect 6.4x6.4 smd: 69(0,0)
  rect 6.4x6.4 smd far side: 69(0,0)
  rrect20% 1.24x1.24 on Top Paste: Un1(-2.4,2.4) Un2(-2.4,0.8) Un3(-2.4,-0.8) Un4(-2.4,-2.4) Un5(-0.8,2.4) Un6(-0.8,0.8) Un7(-0.8,-0.8) Un8(-0.8,-2.4) Un9(0.8,2.4) Un10(0.8,0.8) Un11(0.8,-0.8) Un12(0.8,-2.4) Un13(2.4,2.4) Un14(2.4,0.8) Un15(2.4,-0.8) Un16(2.4,-2.4)
F.SilkS:
  region: -4.11,4.11 -4.35,4.44 -3.87,4.44
  lines w0.254: -4.11,-3.585 -4.11,-4.11 -3.585,-4.11 ; -4.11,3.585 -4.11,3.87 ; -3.81,4.11 -3.585,4.11 ; 3.585,-4.11 4.11,-4.11 4.11,-3.585 ; 3.585,4.11 4.11,4.11 4.11,3.585
Top Component Center:
  lines w0.127: -0.127,0 0.127,0 -0.127,0 ; 0,-0.127 0,0.127 0,-0.127
Top Assembly:
  region: 4,-4 -4,-4 -4,3 -3,4 4,4
Top Courtyard:
  lines w0.254: -4.6,-3.58 -4.6,3.58 -4.25,3.58 -4.25,4.25 -3.58,4.25 -3.58,4.6 3.58,4.6 3.58,4.25 4.25,4.25 4.25,3.58 4.6,3.58 4.6,-3.58 4.25,-3.58 4.25,-4.25 3.58,-4.25 3.58,-4.6 -3.58,-4.6 -3.58,-4.25 -4.25,-4.25 -4.25,-3.58 -4.6,-3.58
Top Designator:
  text ".Designator" at -3.43,-0.344 h1.52
3D body "QFN-68-1EP_8x8mm_P0.4mm_EP5.2x5.2mm.step": height 0.87, standoff 0, extent -4,-4 4,4

## QFN-72-1EP_10x10mm_P0.5mm_EP6x6mm [mm] "QFN-72-1EP_10x10mm_P0.5mm_EP6x6mm"
pads (82):
  rrect25% 0.875x0.25 smd: 1(-4.938,4.25) 2(-4.938,3.75) 3(-4.938,3.25) 4(-4.938,2.75) 5(-4.938,2.25) 6(-4.938,1.75) 7(-4.938,1.25) 8(-4.938,0.75) 9(-4.938,0.25) 10(-4.938,-0.25) 11(-4.938,-0.75) 12(-4.938,-1.25) 13(-4.938,-1.75) 14(-4.938,-2.25) 15(-4.938,-2.75) 16(-4.938,-3.25) 17(-4.938,-3.75) 18(-4.938,-4.25) 37(4.938,-4.25) 38(4.938,-3.75) 39(4.938,-3.25) 40(4.938,-2.75) 41(4.938,-2.25) 42(4.938,-1.75) 43(4.938,-1.25) 44(4.938,-0.75) 45(4.938,-0.25) 46(4.938,0.25) 47(4.938,0.75) 48(4.938,1.25) 49(4.938,1.75) 50(4.938,2.25) 51(4.938,2.75) 52(4.938,3.25) 53(4.938,3.75) 54(4.938,4.25)
  rrect25% 0.25x0.875 smd: 19(-4.25,-4.938) 20(-3.75,-4.938) 21(-3.25,-4.938) 22(-2.75,-4.938) 23(-2.25,-4.938) 24(-1.75,-4.938) 25(-1.25,-4.938) 26(-0.75,-4.938) 27(-0.25,-4.938) 28(0.25,-4.938) 29(0.75,-4.938) 30(1.25,-4.938) 31(1.75,-4.938) 32(2.25,-4.938) 33(2.75,-4.938) 34(3.25,-4.938) 35(3.75,-4.938) 36(4.25,-4.938) 55(4.25,4.938) 56(3.75,4.938) 57(3.25,4.938) 58(2.75,4.938) 59(2.25,4.938) 60(1.75,4.938) 61(1.25,4.938) 62(0.75,4.938) 63(0.25,4.938) 64(-0.25,4.938) 65(-0.75,4.938) 66(-1.25,4.938) 67(-1.75,4.938) 68(-2.25,4.938) 69(-2.75,4.938) 70(-3.25,4.938) 71(-3.75,4.938) 72(-4.25,4.938)
  rect 6x6 smd: 73(0,0)
  rrect16% 1.61x1.61 on Top Paste: Un1(-2,2) Un2(-2,0) Un3(-2,-2) Un4(0,2) Un5(0,0) Un6(0,-2) Un7(2,2) Un8(2,0) Un9(2,-2)
F.SilkS:
  region: -5.11,5.11 -5.35,5.44 -4.87,5.44
  lines w0.254: -5.11,-4.635 -5.11,-5.11 -4.635,-5.11 ; -5.11,4.635 -5.11,4.87 ; -4.81,5.11 -4.635,5.11 ; 4.635,-5.11 5.11,-5.11 5.11,-4.635 ; 4.635,5.11 5.11,5.11 5.11,4.635
Top Component Center:
  lines w0.127: -0.127,0 0.127,0 -0.127,0 ; 0,-0.127 0,0.127 0,-0.127
Top Assembly:
  region: 5,-5 -5,-5 -5,4 -4,5 5,5
Top Courtyard:
  lines w0.254: -5.63,-4.63 -5.63,4.63 -5.25,4.63 -5.25,5.25 -4.63,5.25 -4.63,5.63 4.63,5.63 4.63,5.25 5.25,5.25 5.25,4.63 5.63,4.63 5.63,-4.63 5.25,-4.63 5.25,-5.25 4.63,-5.25 4.63,-5.63 -4.63,-5.63 -4.63,-5.25 -5.25,-5.25 -5.25,-4.63 -5.63,-4.63
Top Designator:
  text ".Designator" at -3.43,-0.344 h1.52

## QFN-72-1EP_10x10mm_P0.5mm_EP6x6mm_ThermalVias [mm] "QFN-72-1EP_10x10mm_P0.5mm_EP6x6mm_ThermalVias"
pads (135):
  rrect25% 0.875x0.25 smd: 1(-4.938,4.25) 2(-4.938,3.75) 3(-4.938,3.25) 4(-4.938,2.75) 5(-4.938,2.25) 6(-4.938,1.75) 7(-4.938,1.25) 8(-4.938,0.75) 9(-4.938,0.25) 10(-4.938,-0.25) 11(-4.938,-0.75) 12(-4.938,-1.25) 13(-4.938,-1.75) 14(-4.938,-2.25) 15(-4.938,-2.75) 16(-4.938,-3.25) 17(-4.938,-3.75) 18(-4.938,-4.25) 37(4.938,-4.25) 38(4.938,-3.75) 39(4.938,-3.25) 40(4.938,-2.75) 41(4.938,-2.25) 42(4.938,-1.75) 43(4.938,-1.25) 44(4.938,-0.75) 45(4.938,-0.25) 46(4.938,0.25) 47(4.938,0.75) 48(4.938,1.25) 49(4.938,1.75) 50(4.938,2.25) 51(4.938,2.75) 52(4.938,3.25) 53(4.938,3.75) 54(4.938,4.25)
  rrect25% 0.25x0.875 smd: 19(-4.25,-4.938) 20(-3.75,-4.938) 21(-3.25,-4.938) 22(-2.75,-4.938) 23(-2.25,-4.938) 24(-1.75,-4.938) 25(-1.25,-4.938) 26(-0.75,-4.938) 27(-0.25,-4.938) 28(0.25,-4.938) 29(0.75,-4.938) 30(1.25,-4.938) 31(1.75,-4.938) 32(2.25,-4.938) 33(2.75,-4.938) 34(3.25,-4.938) 35(3.75,-4.938) 36(4.25,-4.938) 55(4.25,4.938) 56(3.75,4.938) 57(3.25,4.938) 58(2.75,4.938) 59(2.25,4.938) 60(1.75,4.938) 61(1.25,4.938) 62(0.75,4.938) 63(0.25,4.938) 64(-0.25,4.938) 65(-0.75,4.938) 66(-1.25,4.938) 67(-1.75,4.938) 68(-2.25,4.938) 69(-2.75,4.938) 70(-3.25,4.938) 71(-3.75,4.938) 72(-4.25,4.938)
  round 0.5 hole 0.2: 73(-2.75,-2.75) 73(-2.75,-1.65) 73(-2.75,-0.55) 73(-2.75,0.55) 73(-2.75,1.65) 73(-2.75,2.75) 73(-1.65,-2.75) 73(-1.65,-1.65) 73(-1.65,-0.55) 73(-1.65,0.55) 73(-1.65,1.65) 73(-1.65,2.75) 73(-0.55,-2.75) 73(-0.55,-1.65) 73(-0.55,-0.55) 73(-0.55,0.55) 73(-0.55,1.65) 73(-0.55,2.75) 73(0.55,-2.75) 73(0.55,-1.65) 73(0.55,-0.55) 73(0.55,0.55) 73(0.55,1.65) 73(0.55,2.75) 73(1.65,-2.75) 73(1.65,-1.65) 73(1.65,-0.55) 73(1.65,0.55) 73(1.65,1.65) 73(1.65,2.75) 73(2.75,-2.75) 73(2.75,-1.65) 73(2.75,-0.55) 73(2.75,0.55) 73(2.75,1.65) 73(2.75,2.75)
  rect 6x6 smd: 73(0,0)
  rect 6x6 smd far side: 73(0,0)
  rrect25% 0.93x0.93 on Top Paste: Un1(-2.4,2.4) Un2(-2.4,1.2) Un3(-2.4,0) Un4(-2.4,-1.2) Un5(-2.4,-2.4) Un6(-1.2,2.4) Un7(-1.2,1.2) Un8(-1.2,0) Un9(-1.2,-1.2) Un10(-1.2,-2.4) Un11(0,2.4) Un12(0,1.2) Un13(0,0) Un14(0,-1.2) Un15(0,-2.4) Un16(1.2,2.4) Un17(1.2,1.2) Un18(1.2,0) Un19(1.2,-1.2) Un20(1.2,-2.4) Un21(2.4,2.4) Un22(2.4,1.2) Un23(2.4,0) Un24(2.4,-1.2) Un25(2.4,-2.4)
F.SilkS:
  region: -5.11,5.11 -5.35,5.44 -4.87,5.44
  lines w0.254: -5.11,-4.635 -5.11,-5.11 -4.635,-5.11 ; -5.11,4.635 -5.11,4.87 ; -4.81,5.11 -4.635,5.11 ; 4.635,-5.11 5.11,-5.11 5.11,-4.635 ; 4.635,5.11 5.11,5.11 5.11,4.635
Top Component Center:
  lines w0.127: -0.127,0 0.127,0 -0.127,0 ; 0,-0.127 0,0.127 0,-0.127
Top Assembly:
  region: 5,-5 -5,-5 -5,4 -4,5 5,5
Top Courtyard:
  lines w0.254: -5.63,-4.63 -5.63,4.63 -5.25,4.63 -5.25,5.25 -4.63,5.25 -4.63,5.63 4.63,5.63 4.63,5.25 5.25,5.25 5.25,4.63 5.63,4.63 5.63,-4.63 5.25,-4.63 5.25,-5.25 4.63,-5.25 4.63,-5.63 -4.63,-5.63 -4.63,-5.25 -5.25,-5.25 -5.25,-4.63 -5.63,-4.63
Top Designator:
  text ".Designator" at -3.43,-0.344 h1.52

## QFN-76-1EP_9x9mm_P0.4mm_EP3.8x3.8mm [mm] "QFN-76-1EP_9x9mm_P0.4mm_EP3.8x3.8mm"
pads (86):
  rrect25% 0.825x0.2 smd: 1(-4.437,3.6) 2(-4.437,3.2) 3(-4.437,2.8) 4(-4.437,2.4) 5(-4.437,2) 6(-4.437,1.6) 7(-4.437,1.2) 8(-4.437,0.8) 9(-4.437,0.4) 10(-4.437,0) 11(-4.437,-0.4) 12(-4.437,-0.8) 13(-4.437,-1.2) 14(-4.437,-1.6) 15(-4.437,-2) 16(-4.437,-2.4) 17(-4.437,-2.8) 18(-4.437,-3.2) 19(-4.437,-3.6) 39(4.437,-3.6) 40(4.437,-3.2) 41(4.437,-2.8) 42(4.437,-2.4) 43(4.437,-2) 44(4.437,-1.6) 45(4.437,-1.2) 46(4.437,-0.8) 47(4.437,-0.4) 48(4.437,0) 49(4.437,0.4) 50(4.437,0.8) 51(4.437,1.2) 52(4.437,1.6) 53(4.437,2) 54(4.437,2.4) 55(4.437,2.8) 56(4.437,3.2) 57(4.437,3.6)
  rrect25% 0.2x0.825 smd: 20(-3.6,-4.437) 21(-3.2,-4.437) 22(-2.8,-4.437) 23(-2.4,-4.437) 24(-2,-4.437) 25(-1.6,-4.437) 26(-1.2,-4.437) 27(-0.8,-4.437) 28(-0.4,-4.437) 29(0,-4.437) 30(0.4,-4.437) 31(0.8,-4.437) 32(1.2,-4.437) 33(1.6,-4.437) 34(2,-4.437) 35(2.4,-4.437) 36(2.8,-4.437) 37(3.2,-4.437) 38(3.6,-4.437) 58(3.6,4.437) 59(3.2,4.437) 60(2.8,4.437) 61(2.4,4.437) 62(2,4.437) 63(1.6,4.437) 64(1.2,4.437) 65(0.8,4.437) 66(0.4,4.437) 67(0,4.437) 68(-0.4,4.437) 69(-0.8,4.437) 70(-1.2,4.437) 71(-1.6,4.437) 72(-2,4.437) 73(-2.4,4.437) 74(-2.8,4.437) 75(-3.2,4.437) 76(-3.6,4.437)
  rect 3.8x3.8 smd: 77(0,0)
  rrect25% 1.02x1.02 on Top Paste: Un1(-1.27,1.27) Un2(-1.27,0) Un3(-1.27,-1.27) Un4(0,1.27) Un5(0,0) Un6(0,-1.27) Un7(1.27,1.27) Un8(1.27,0) Un9(1.27,-1.27)
F.SilkS:
  region: -4.61,4.61 -4.85,4.94 -4.37,4.94
  lines w0.254: -4.61,-3.96 -4.61,-4.61 -3.96,-4.61 ; -4.61,3.96 -4.61,4.37 ; -4.31,4.61 -3.96,4.61 ; 3.96,-4.61 4.61,-4.61 4.61,-3.96 ; 3.96,4.61 4.61,4.61 4.61,3.96
Top Component Center:
  lines w0.127: -0.127,0 0.127,0 -0.127,0 ; 0,-0.127 0,0.127 0,-0.127
Top Assembly:
  region: 4.5,-4.5 -4.5,-4.5 -4.5,3.5 -3.5,4.5 4.5,4.5
Top Courtyard:
  lines w0.254: -5.1,-3.95 -5.1,3.95 -4.75,3.95 -4.75,4.75 -3.95,4.75 -3.95,5.1 3.95,5.1 3.95,4.75 4.75,4.75 4.75,3.95 5.1,3.95 5.1,-3.95 4.75,-3.95 4.75,-4.75 3.95,-4.75 3.95,-5.1 -3.95,-5.1 -3.95,-4.75 -4.75,-4.75 -4.75,-3.95 -5.1,-3.95
Top Designator:
  text ".Designator" at -3.43,-0.344 h1.52
3D body "QFN-76-1EP_9x9mm_P0.4mm_EP3.8x3.8mm.step": height 0.87, standoff 0, extent -4.5,-4.5 4.5,4.5

## QFN-76-1EP_9x9mm_P0.4mm_EP3.8x3.8mm_ThermalVias [mm] "QFN-76-1EP_9x9mm_P0.4mm_EP3.8x3.8mm_ThermalVias"
pads (96):
  rrect25% 0.825x0.2 smd: 1(-4.437,3.6) 2(-4.437,3.2) 3(-4.437,2.8) 4(-4.437,2.4) 5(-4.437,2) 6(-4.437,1.6) 7(-4.437,1.2) 8(-4.437,0.8) 9(-4.437,0.4) 10(-4.437,0) 11(-4.437,-0.4) 12(-4.437,-0.8) 13(-4.437,-1.2) 14(-4.437,-1.6) 15(-4.437,-2) 16(-4.437,-2.4) 17(-4.437,-2.8) 18(-4.437,-3.2) 19(-4.437,-3.6) 39(4.437,-3.6) 40(4.437,-3.2) 41(4.437,-2.8) 42(4.437,-2.4) 43(4.437,-2) 44(4.437,-1.6) 45(4.437,-1.2) 46(4.437,-0.8) 47(4.437,-0.4) 48(4.437,0) 49(4.437,0.4) 50(4.437,0.8) 51(4.437,1.2) 52(4.437,1.6) 53(4.437,2) 54(4.437,2.4) 55(4.437,2.8) 56(4.437,3.2) 57(4.437,3.6)
  rrect25% 0.2x0.825 smd: 20(-3.6,-4.437) 21(-3.2,-4.437) 22(-2.8,-4.437) 23(-2.4,-4.437) 24(-2,-4.437) 25(-1.6,-4.437) 26(-1.2,-4.437) 27(-0.8,-4.437) 28(-0.4,-4.437) 29(0,-4.437) 30(0.4,-4.437) 31(0.8,-4.437) 32(1.2,-4.437) 33(1.6,-4.437) 34(2,-4.437) 35(2.4,-4.437) 36(2.8,-4.437) 37(3.2,-4.437) 38(3.6,-4.437) 58(3.6,4.437) 59(3.2,4.437) 60(2.8,4.437) 61(2.4,4.437) 62(2,4.437) 63(1.6,4.437) 64(1.2,4.437) 65(0.8,4.437) 66(0.4,4.437) 67(0,4.437) 68(-0.4,4.437) 69(-0.8,4.437) 70(-1.2,4.437) 71(-1.6,4.437) 72(-2,4.437) 73(-2.4,4.437) 74(-2.8,4.437) 75(-3.2,4.437) 76(-3.6,4.437)
  round 0.5 hole 0.2: 77(-1.2,-1.2) 77(-1.2,0) 77(-1.2,1.2) 77(0,-1.2) 77(0,0) 77(0,1.2) 77(1.2,-1.2) 77(1.2,0) 77(1.2,1.2)
  rect 3.8x3.8 smd: 77(0,0)
  rect 2.9x2.9 smd far side: 77(0,0)
  rrect25% 1.02x1.02 on Top Paste: Un1(-1.27,1.27) Un2(-1.27,0) Un3(-1.27,-1.27) Un4(0,1.27) Un5(0,0) Un6(0,-1.27) Un7(1.27,1.27) Un8(1.27,0) Un9(1.27,-1.27)
F.SilkS:
  region: -4.61,4.61 -4.85,4.94 -4.37,4.94
  lines w0.254: -4.61,-3.96 -4.61,-4.61 -3.96,-4.61 ; -4.61,3.96 -4.61,4.37 ; -4.31,4.61 -3.96,4.61 ; 3.96,-4.61 4.61,-4.61 4.61,-3.96 ; 3.96,4.61 4.61,4.61 4.61,3.96
Top Component Center:
  lines w0.127: -0.127,0 0.127,0 -0.127,0 ; 0,-0.127 0,0.127 0,-0.127
Top Assembly:
  region: 4.5,-4.5 -4.5,-4.5 -4.5,3.5 -3.5,4.5 4.5,4.5
Top Courtyard:
  lines w0.254: -5.1,-3.95 -5.1,3.95 -4.75,3.95 -4.75,4.75 -3.95,4.75 -3.95,5.1 3.95,5.1 3.95,4.75 4.75,4.75 4.75,3.95 5.1,3.95 5.1,-3.95 4.75,-3.95 4.75,-4.75 3.95,-4.75 3.95,-5.1 -3.95,-5.1 -3.95,-4.75 -4.75,-4.75 -4.75,-3.95 -5.1,-3.95
Top Designator:
  text ".Designator" at -3.43,-0.344 h1.52
3D body "QFN-76-1EP_9x9mm_P0.4mm_EP3.8x3.8mm.step": height 0.87, standoff 0, extent -4.5,-4.5 4.5,4.5

## QFN-76-1EP_9x9mm_P0.4mm_EP5.81x6.31mm [mm] "QFN-76-1EP_9x9mm_P0.4mm_EP5.81x6.31mm"
pads (86):
  rrect25% 0.875x0.2 smd: 1(-4.437,3.6) 2(-4.437,3.2) 3(-4.437,2.8) 4(-4.437,2.4) 5(-4.437,2) 6(-4.437,1.6) 7(-4.437,1.2) 8(-4.437,0.8) 9(-4.437,0.4) 10(-4.437,0) 11(-4.437,-0.4) 12(-4.437,-0.8) 13(-4.437,-1.2) 14(-4.437,-1.6) 15(-4.437,-2) 16(-4.437,-2.4) 17(-4.437,-2.8) 18(-4.437,-3.2) 19(-4.437,-3.6) 39(4.437,-3.6) 40(4.437,-3.2) 41(4.437,-2.8) 42(4.437,-2.4) 43(4.437,-2) 44(4.437,-1.6) 45(4.437,-1.2) 46(4.437,-0.8) 47(4.437,-0.4) 48(4.437,0) 49(4.437,0.4) 50(4.437,0.8) 51(4.437,1.2) 52(4.437,1.6) 53(4.437,2) 54(4.437,2.4) 55(4.437,2.8) 56(4.437,3.2) 57(4.437,3.6)
  rrect25% 0.2x0.875 smd: 20(-3.6,-4.437) 21(-3.2,-4.437) 22(-2.8,-4.437) 23(-2.4,-4.437) 24(-2,-4.437) 25(-1.6,-4.437) 26(-1.2,-4.437) 27(-0.8,-4.437) 28(-0.4,-4.437) 29(0,-4.437) 30(0.4,-4.437) 31(0.8,-4.437) 32(1.2,-4.437) 33(1.6,-4.437) 34(2,-4.437) 35(2.4,-4.437) 36(2.8,-4.437) 37(3.2,-4.437) 38(3.6,-4.437) 58(3.6,4.437) 59(3.2,4.437) 60(2.8,4.437) 61(2.4,4.437) 62(2,4.437) 63(1.6,4.437) 64(1.2,4.437) 65(0.8,4.437) 66(0.4,4.437) 67(0,4.437) 68(-0.4,4.437) 69(-0.8,4.437) 70(-1.2,4.437) 71(-1.6,4.437) 72(-2,4.437) 73(-2.4,4.437) 74(-2.8,4.437) 75(-3.2,4.437) 76(-3.6,4.437)
  rect 5.81x6.31 smd: 77(0,0)
  rrect16% 1.56x1.7 on Top Paste: Un1(-1.94,2.1) Un2(-1.94,0) Un3(-1.94,-2.1) Un4(0,2.1) Un5(0,0) Un6(0,-2.1) Un7(1.94,2.1) Un8(1.94,0) Un9(1.94,-2.1)
F.SilkS:
  region: -4.61,4.61 -4.85,4.94 -4.37,4.94
  lines w0.254: -4.61,-3.96 -4.61,-4.61 -3.96,-4.61 ; -4.61,3.96 -4.61,4.37 ; -4.31,4.61 -3.96,4.61 ; 3.96,-4.61 4.61,-4.61 4.61,-3.96 ; 3.96,4.61 4.61,4.61 4.61,3.96
Top Component Center:
  lines w0.127: -0.127,0 0.127,0 -0.127,0 ; 0,-0.127 0,0.127 0,-0.127
Top Assembly:
  region: 4.5,-4.5 -4.5,-4.5 -4.5,3.5 -3.5,4.5 4.5,4.5
Top Courtyard:
  lines w0.254: -5.13,-3.95 -5.13,3.95 -4.75,3.95 -4.75,4.75 -3.95,4.75 -3.95,5.13 3.95,5.13 3.95,4.75 4.75,4.75 4.75,3.95 5.13,3.95 5.13,-3.95 4.75,-3.95 4.75,-4.75 3.95,-4.75 3.95,-5.13 -3.95,-5.13 -3.95,-4.75 -4.75,-4.75 -4.75,-3.95 -5.13,-3.95
Top Designator:
  text ".Designator" at -3.43,-0.344 h1.52
3D body "QFN-76-1EP_9x9mm_P0.4mm_EP5.81x6.31mm.step": height 0.88, standoff 0, extent -4.5,-4.5 4.5,4.5